# Altium footprint library PCB_ConnectorHDR.PcbLib: 139 footprints (part 7 of 9)
Each footprint in its own frame and in the unit in brackets; x right, y up, seen from the top. Pads: shape width x height; smd on the part's side, far side on the other; paste and mask are expansions set on the pad; w line width, h text height; cw(c..) or ccw(c..) is an arc to the next point about the centre after c.
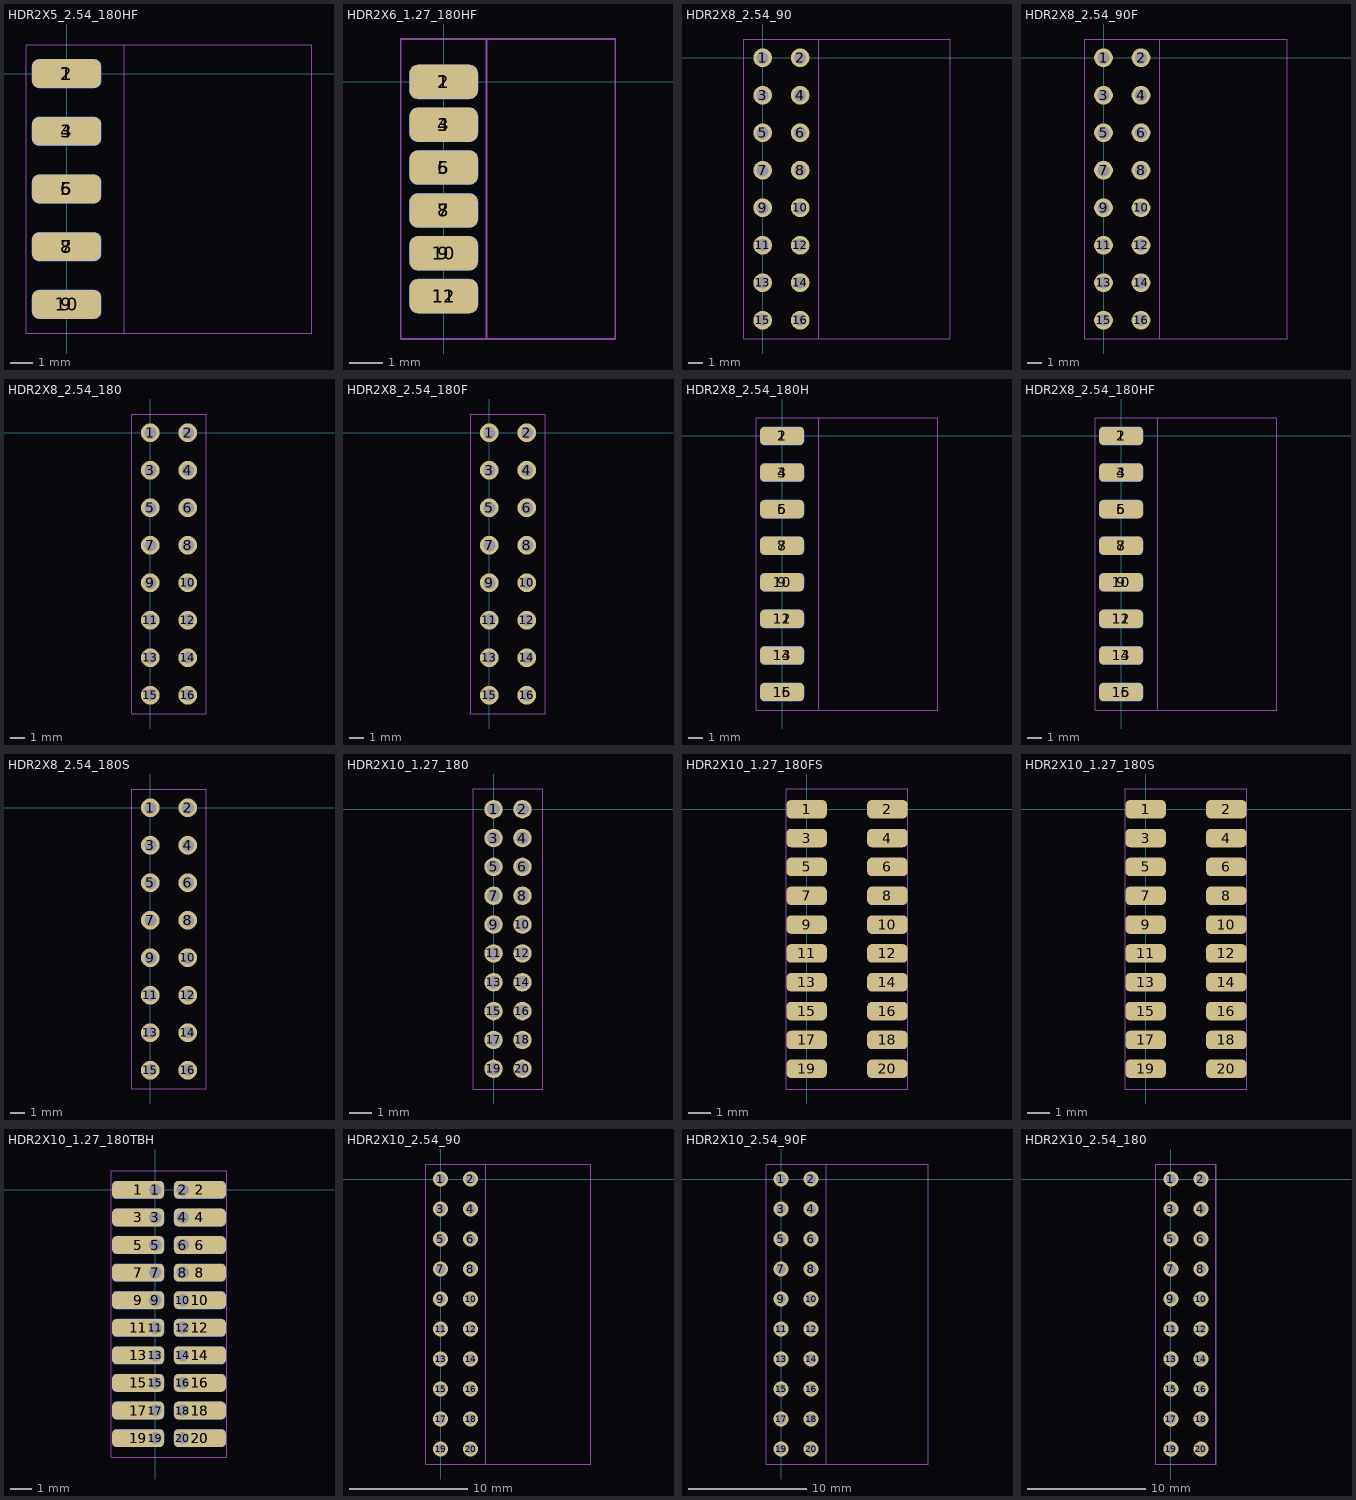
[diagram p6: the footprints below, top view; thin cyan lines are the x and y axes]

## HDR2X5_2.54_180HF [mil]
height 169.29
pads (10):
  rrect50% 120x50 smd: 1(0,0) 3(0,-100) 5(0,-200) 7(0,-300) 9(0,-400)
  rrect50% 120x50 smd far side: 2(0,0) 4(0,-100) 6(0,-200) 8(0,-300) 10(0,-400)
Mechanical 13:
  lines w2: -70,-450 -70,50 425,50 425,-450 -70,-450
T-Component:
  lines w2: -70,-450 -70,50 100,50 100,-450 -70,-450
  text ".Designator" at -31,-370 h80
B-Component:
  lines w2: -70,-450 -70,50 100,50 100,-450 -70,-450
3D body "female_header_a-bl254-dg-g10d.stp": height 76.43, standoff -120.43, extent -35.98,-454.92 424.65,54.92

## HDR2X6_1.27_180HF [mil]
height 169.29
pads (12):
  rrect50% 80x40 smd: 1(0,0) 3(0,-50) 5(0,-100) 7(0,-150) 9(0,-200) 11(0,-250)
  rrect50% 80x40 smd far side: 2(0,0) 4(0,-50) 6(0,-100) 8(0,-150) 10(0,-200) 12(0,-250)
Mechanical 13:
  lines w2: -50,-300 200,-300 200,50 -50,50 -50,-300
T-Component:
  lines w2: -50,-300 50,-300 50,50 -50,50 -50,-300
  text ".Designator" at -31,-145 h80
3D body "female_header_a-bl127-dg-g12d.stp": height 39.02, standoff -83.02, extent -28.35,-282.88 200,32.88

## HDR2X8_2.54_90 [mil]
height 169.29
pads (16):
  round 50 hole 32: 1(0,0) 2(100,0) 3(0,-100) 4(100,-100) 5(0,-200) 6(100,-200) 7(0,-300) 8(100,-300) 9(0,-400) 10(100,-400) 11(0,-500) 12(100,-500) 13(0,-600) 14(100,-600) 15(0,-700) 16(100,-700)
Mechanical 13:
  lines w2: -50,-750 -50,50 500,50 500,-750 -50,-750
T-Component:
  lines w2: -50,-750 -50,50 150,50 150,-750 -50,-750
  text ".Designator" at 19,-370 h80
3D body "pin_header_awl254-da-g16d.stp": height 198.43, standoff -116.54, extent -10,-750 497.09,50

## HDR2X8_2.54_90F [mil]
height 169.29
pads (16):
  round 50 hole 32: 1(0,0) 2(100,0) 3(0,-100) 4(100,-100) 5(0,-200) 6(100,-200) 7(0,-300) 8(100,-300) 9(0,-400) 10(100,-400) 11(0,-500) 12(100,-500) 13(0,-600) 14(100,-600) 15(0,-700) 16(100,-700)
Mechanical 13:
  lines w2: -50,-750 490,-750 490,50 -50,50 -50,-750
T-Component:
  lines w2: -50,-750 150,-750 150,50 -50,50 -50,-750
  text ".Designator" at 19,-370 h80
3D body "female_header_a-bl254-da-g16d.stp": height 198.43, standoff -124.41, extent -10,-754.92 486.06,54.92

## HDR2X8_2.54_180 [mil]
height 169.29
pads (16):
  round 50 hole 32: 1(0,0) 2(100,0) 3(0,-100) 4(100,-100) 5(0,-200) 6(100,-200) 7(0,-300) 8(100,-300) 9(0,-400) 10(100,-400) 11(0,-500) 12(100,-500) 13(0,-600) 14(100,-600) 15(0,-700) 16(100,-700)
Mechanical 13:
  lines w2: -50,-750 -50,50 150,50 150,-750 -50,-750
T-Component:
  lines w2: -50,-750 -50,50 150,50 150,-750 -50,-750
  text ".Designator" at 19,-370 h80
3D body "pin_header_awl254-dg-g16d.stp": height 334.65, standoff -118.11, extent -50,-749.99 150,50.01

## HDR2X8_2.54_180F [mil]
height 169.29
pads (16):
  round 50 hole 32: 1(0,0) 2(100,0) 3(0,-100) 4(100,-100) 5(0,-200) 6(100,-200) 7(0,-300) 8(100,-300) 9(0,-400) 10(100,-400) 11(0,-500) 12(100,-500) 13(0,-600) 14(100,-600) 15(0,-700) 16(100,-700)
Mechanical 13:
  lines w2: -50,-750 150,-750 150,50 -50,50 -50,-750
T-Component:
  lines w2: -50,-750 150,-750 150,50 -50,50 -50,-750
  text ".Designator" at 19,-370 h80
3D body "female_header_a-bl254-dg-g16d.stp": height 334.65, standoff -125.98, extent -48.42,-754.92 148.43,54.93

## HDR2X8_2.54_180H [mil]
height 169.29
pads (16):
  rrect50% 120x50 smd: 1(0,0) 3(0,-100) 5(0,-200) 7(0,-300) 9(0,-400) 11(0,-500) 13(0,-600) 15(0,-700)
  rrect50% 120x50 smd far side: 2(0,0) 4(0,-100) 6(0,-200) 8(0,-300) 10(0,-400) 12(0,-500) 14(0,-600) 16(0,-700)
Mechanical 13:
  lines w2: -70,-750 425,-750 425,50 -70,50 -70,-750
T-Component:
  lines w2: -70,-750 -70,50 100,50 100,-750 -70,-750
  text ".Designator" at -26,-370 h80
B-Component:
  lines w2: -70,-750 -70,50 100,50 100,-750 -70,-750
3D body "pin_header_awl254-dg-g16d.stp": height 78, standoff -122, extent -38.11,-749.99 414.65,50.01

## HDR2X8_2.54_180HF [mil]
height 169.29
pads (16):
  rrect50% 120x50 smd: 1(0,0) 3(0,-100) 5(0,-200) 7(0,-300) 9(0,-400) 11(0,-500) 13(0,-600) 15(0,-700)
  rrect50% 120x50 smd far side: 2(0,0) 4(0,-100) 6(0,-200) 8(0,-300) 10(0,-400) 12(0,-500) 14(0,-600) 16(0,-700)
Mechanical 13:
  lines w2: -70,-750 425,-750 425,50 -70,50 -70,-750
T-Component:
  lines w2: -70,-750 -70,50 100,50 100,-750 -70,-750
  text ".Designator" at -31,-370 h80
B-Component:
  lines w2: -70,-750 -70,50 100,50 100,-750 -70,-750
3D body "female_header_a-bl254-dg-g16d.stp": height 76.43, standoff -120.43, extent -35.98,-754.92 424.65,54.92

## HDR2X8_2.54_180S [mil]
height 169.29
pads (16):
  round 50 hole 32: 1(0,0) 2(100,0) 3(0,-100) 4(100,-100) 5(0,-200) 6(100,-200) 7(0,-300) 8(100,-300) 9(0,-400) 10(100,-400) 11(0,-500) 12(100,-500) 13(0,-600) 14(100,-600) 15(0,-700) 16(100,-700)
Mechanical 13:
  lines w2: -50,-750 -50,50 150,50 150,-750 -50,-750
T-Component:
  lines w2: -50,-750 -50,50 150,50 150,-750 -50,-750
  text ".Designator" at 19,-370 h80
3D body "pin_header_a-sl254-dg-g16mp1.stp": height 334.71, standoff -48.82, extent -97.64,-750 197.64,50

## HDR2X10_1.27_180 [mil]
height 169.29
pads (20):
  round 32 hole 22: 1(0,0) 2(50,0) 3(0,-50) 4(50,-50) 5(0,-100) 6(50,-100) 7(0,-150) 8(50,-150) 9(0,-200) 10(50,-200) 11(0,-250) 12(50,-250) 13(0,-300) 14(50,-300) 15(0,-350) 16(50,-350) 17(0,-400) 18(50,-400) 19(0,-450) 20(50,-450)
Mechanical 13:
  lines w2: -35,-485 85,-485 85,35 -35,35 -35,-485
T-Component:
  lines w2: -35,-485 -35,35 85,35 85,-485 -35,-485
  text ".Designator" at -1,-245 h80

## HDR2X10_1.27_180FS [mil]
height 169.29
pads (20):
  rrect50% 70x32 smd: 1(0,0) 2(140,0) 3(0,-50) 4(140,-50) 5(0,-100) 6(140,-100) 7(0,-150) 8(140,-150) 9(0,-200) 10(140,-200) 11(0,-250) 12(140,-250) 13(0,-300) 14(140,-300) 15(0,-350) 16(140,-350) 17(0,-400) 18(140,-400) 19(0,-450) 20(140,-450)
Mechanical 13:
  lines w2: -35,-485 175,-485 175,35 -35,35 -35,-485
T-Component:
  lines w2: -35,-485 175,-485 175,35 -35,35 -35,-485
  text ".Designator" at 44,-245 h80
3D body "female_header_a-bl127-dg-g20mp1.stp": height 185.29, standoff 8.13, extent -20.54,-482.88 160.56,32.87

## HDR2X10_1.27_180S [mil]
height 169.29
pads (20):
  rrect50% 70x32 smd: 1(0,0) 2(140,0) 3(0,-50) 4(140,-50) 5(0,-100) 6(140,-100) 7(0,-150) 8(140,-150) 9(0,-200) 10(140,-200) 11(0,-250) 12(140,-250) 13(0,-300) 14(140,-300) 15(0,-350) 16(140,-350) 17(0,-400) 18(140,-400) 19(0,-450) 20(140,-450)
Mechanical 13:
  lines w2: -35,-485 -35,35 175,35 175,-485 -35,-485
T-Component:
  lines w2: -35,-485 -35,35 175,35 175,-485 -35,-485
  text ".Designator" at 44,-245 h80
3D body "pin_header_a-sl127-dg-g20mp1.stp": height 252.13, standoff 0.25, extent -38.31,-475 178.31,25

## HDR2X10_1.27_180TBH [mil]
height 169.29
pads (60):
  rrect50% 94x32 smd: 1(-31,0) 2(81,0) 3(-31,-50) 4(81,-50) 5(-31,-100) 6(81,-100) 7(-31,-150) 8(81,-150) 9(-31,-200) 10(81,-200) 11(-31,-250) 12(81,-250) 13(-31,-300) 14(81,-300) 15(-31,-350) 16(81,-350) 17(-31,-400) 18(81,-400) 19(-31,-450) 20(81,-450)
  rrect50% 94x32 smd far side: 1(-31,0) 2(81,0) 3(-31,-50) 4(81,-50) 5(-31,-100) 6(81,-100) 7(-31,-150) 8(81,-150) 9(-31,-200) 10(81,-200) 11(-31,-250) 12(81,-250) 13(-31,-300) 14(81,-300) 15(-31,-350) 16(81,-350) 17(-31,-400) 18(81,-400) 19(-31,-450) 20(81,-450)
  round 32 hole 22: 1(0,0) 2(50,0) 3(0,-50) 4(50,-50) 5(0,-100) 6(50,-100) 7(0,-150) 8(50,-150) 9(0,-200) 10(50,-200) 11(0,-250) 12(50,-250) 13(0,-300) 14(50,-300) 15(0,-350) 16(50,-350) 17(0,-400) 18(50,-400) 19(0,-450) 20(50,-450)
Mechanical 13:
  lines w2: -80,-485 -80,35 130,35 130,-485 -80,-485
T-Component:
  lines w2: -80,-485 130,-485 130,35 -80,35 -80,-485
  text ".Designator" at -1,-245 h80

## HDR2X10_2.54_90 [mil]
height 169.29
pads (20):
  round 50 hole 32: 1(0,0) 2(100,0) 3(0,-100) 4(100,-100) 5(0,-200) 6(100,-200) 7(0,-300) 8(100,-300) 9(0,-400) 10(100,-400) 11(0,-500) 12(100,-500) 13(0,-600) 14(100,-600) 15(0,-700) 16(100,-700) 17(0,-800) 18(100,-800) 19(0,-900) 20(100,-900)
Mechanical 13:
  lines w2: -50,-950 -50,50 500,50 500,-950 -50,-950
T-Component:
  lines w2: -50,-950 150,-950 150,50 -50,50 -50,-950
  text ".Designator" at 19,-470 h80
3D body "pin_header_awl254-da-g20d.stp": height 198.43, standoff -116.54, extent -12.44,-950 494.65,50

## HDR2X10_2.54_90F [mil]
height 169.29
pads (20):
  round 50 hole 32: 1(0,0) 2(100,0) 3(0,-100) 4(100,-100) 5(0,-200) 6(100,-200) 7(0,-300) 8(100,-300) 9(0,-400) 10(100,-400) 11(0,-500) 12(100,-500) 13(0,-600) 14(100,-600) 15(0,-700) 16(100,-700) 17(0,-800) 18(100,-800) 19(0,-900) 20(100,-900)
Mechanical 13:
  lines w2: -50,-950 -50,50 490,50 490,-950 -50,-950
T-Component:
  lines w2: -50,-950 -50,50 150,50 150,-950 -50,-950
  text ".Designator" at 19,-470 h80
3D body "female_header_a-bl254-da-g20d.stp": height 198.43, standoff -124.41, extent -10,-954.92 486.06,54.92

## HDR2X10_2.54_180 [mil]
height 169.29
pads (20):
  round 50 hole 32: 1(0,0) 2(100,0) 3(0,-100) 4(100,-100) 5(0,-200) 6(100,-200) 7(0,-300) 8(100,-300) 9(0,-400) 10(100,-400) 11(0,-500) 12(100,-500) 13(0,-600) 14(100,-600) 15(0,-700) 16(100,-700) 17(0,-800) 18(100,-800) 19(0,-900) 20(100,-900)
Mechanical 13:
  lines w2: -50,-950 -50,50 150,50 150,-950 -50,-950
T-Component:
  lines w2: -50,-950 -50,50 150,50 150,-950 -50,-950
  text ".Designator" at 19,-470 h80
3D body "pin_header_awl254-dg-g20d.stp": height 334.65, standoff -118.11, extent -50,-950 150,50